# Altium footprint library OK0110_Motorized_Door_Lock_V2.0.PcbLib: 16 footprints
Each footprint in its own frame and in the unit in brackets; x right, y up, seen from the top. Pads: shape width x height; smd on the part's side, far side on the other; paste and mask are expansions set on the pad; w line width, h text height; cw(c..) or ccw(c..) is an arc to the next point about the centre after c.
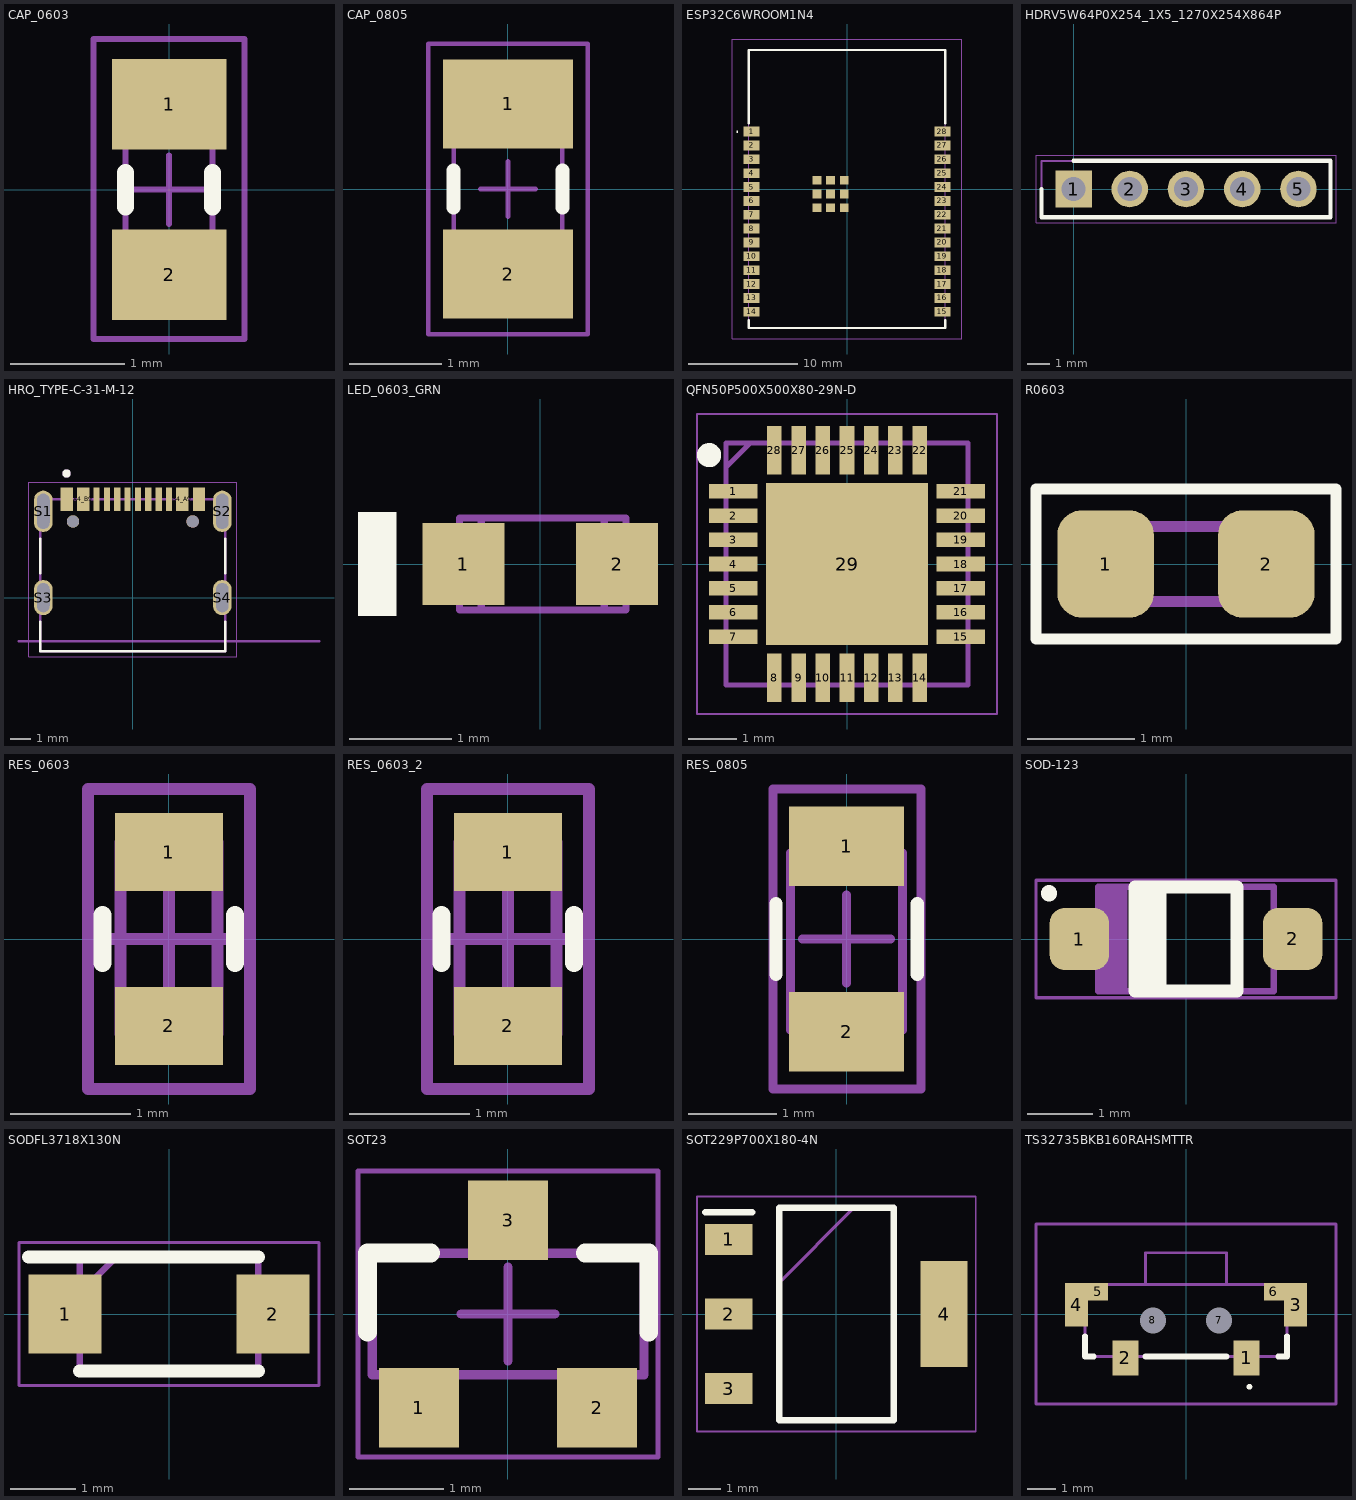
[diagram p0: the footprints below, top view; thin cyan lines are the x and y axes]

## CAP_0603 [mm]
pads (2):
  rect 1x0.79 smd: 1(0,0.745) 2(0,-0.745)
Top Overlay:
  lines w0.15: -0.38,-0.15 -0.38,0.15 ; 0.38,-0.15 0.38,0.15
Mechanical 13:
  lines w0.05: -0.4,-0.8 -0.4,-0.5 -0.38,-0.5 -0.38,0.5 -0.4,0.5 -0.4,0.8 0.4,0.8 0.4,0.5 0.38,0.5 0.38,-0.5 0.4,-0.5 0.4,-0.8 -0.4,-0.8
Mechanical 15:
  lines w0.05: -0.3,0 0.3,0 ; 0,-0.3 0,0.3 ; -0.66,-1.305 -0.66,1.315 0.66,1.315 0.66,-1.305 -0.66,-1.305
3D body: height 0.8, standoff 0, extent -0.4,0.5 0.4,0.8
3D body: height 0.78, standoff 0.02, extent -0.38,-0.5 0.38,0.5
3D body: height 0.8, standoff 0, extent -0.4,-0.8 0.4,-0.5

## CAP_0805 [mm]
pads (2):
  rect 1.4x0.96 smd: 1(0,0.92) 2(0,-0.92)
Top Overlay:
  lines w0.15: -0.59,-0.2 -0.59,0.2 ; 0.59,-0.2 0.59,0.2
Mechanical 13:
  lines w0.05: -0.625,-1 -0.625,-0.5 -0.585,-0.5 -0.585,0.5 -0.625,0.5 -0.625,1 0.625,1 0.625,0.5 0.585,0.5 0.585,-0.5 0.625,-0.5 0.625,-1 -0.625,-1
Mechanical 15:
  lines w0.05: -0.3,0 0.3,0 ; 0,-0.3 0,0.3 ; -0.86,-1.57 0.86,-1.57 0.86,1.57 -0.86,1.57 -0.86,-1.57
3D body: height 1, standoff 0, extent -0.625,0.5 0.625,1
3D body: height 0.94, standoff 0.06, extent -0.585,-0.5 0.585,0.5
3D body: height 1, standoff 0, extent -0.625,-1 0.625,-0.5

## ESP32C6WROOM1N4 [mm]
pads (37):
  rect 1.5x0.9 smd: 1(-8.75,5.26) 2(-8.75,3.99) 3(-8.75,2.72) 4(-8.75,1.45) 5(-8.75,0.18) 6(-8.75,-1.09) 7(-8.75,-2.36) 8(-8.75,-3.63) 9(-8.75,-4.9) 10(-8.75,-6.17) 11(-8.75,-7.44) 12(-8.75,-8.71) 13(-8.75,-9.98) 14(-8.75,-11.25) 15(8.75,-11.25) 16(8.75,-9.98) 17(8.75,-8.71) 18(8.75,-7.44) 19(8.75,-6.17) 20(8.75,-4.9) 21(8.75,-3.63) 22(8.75,-2.36) 23(8.75,-1.09) 24(8.75,0.18) 25(8.75,1.45) 26(8.75,2.72) 27(8.75,3.99) 28(8.75,5.26)
  rect 0.8x0.8 smd: 29(-1.505,-0.46) 30(-1.505,0.79) 31(-2.755,0.79) 32(-2.755,-0.46) 33(-2.755,-1.71) 34(-1.505,-1.71) 35(-0.255,-1.71) 36(-0.255,-0.46) 37(-0.255,0.79)
Top Overlay:
  lines w0.1: -10.1,5.26 cw(c-10.05,5.26) -10,5.26 cw(c-10.05,5.26) -10.1,5.26
  lines w0.2: -9,-12 -9,-12.75 9,-12.75 9,-12 ; -9,6 -9,12.75 9,12.75 9,6
Mechanical 13:
  lines w0.1: -9,-12.75 9,-12.75 9,12.75 -9,12.75 -9,-12.75
Mechanical 15:
  lines w0.1: -10.5,-13.75 10.5,-13.75 10.5,13.75 -10.5,13.75 -10.5,-13.75
3D body "ESP32-C6-WROOM-1-N4.stp": height 3.11, standoff 0, extent -9.01,-12.75 9.01,12.75

## HDRV5W64P0X254_1X5_1270X254X864P [mm]
pads (5):
  rect 1.65x1.65 hole 1.1: 1(0,0)
  round 1.65 hole 1.1: 2(2.54,0) 3(5.08,0) 4(7.62,0) 5(10.16,0)
Top Overlay:
  lines w0.2: -1.445,0 -1.445,-1.27 11.605,-1.27 11.605,1.27 0,1.27
Mechanical 13:
  lines w0.1: -1.445,-1.27 11.605,-1.27 11.605,1.27 -1.445,1.27 -1.445,-1.27
Mechanical 15:
  lines w0.05: -1.695,-1.52 11.855,-1.52 11.855,1.52 -1.695,1.52 -1.695,-1.52
3D body "M20-9990546.stp": height 8.64, standoff -3, extent -1.27,-1.27 11.43,1.27

## HRO_TYPE-C-31-M-12 [mm]
pads (18):
  rect 0.6x1.14 smd mask+0.05: A1_B12(-3.2,4.75) A4_B9(-2.4,4.75) B1_A12(3.2,4.75) B4_A9(2.4,4.75)
  rect 0.3x1.14 smd mask+0.05: A5(-1.25,4.75) A6(-0.25,4.75) A7(0.25,4.75) A8(1.25,4.75) B5(1.75,4.75) B6(0.75,4.75) B7(-0.75,4.75) B8(-1.75,4.75)
  oval 0.9x2 hole 0.6 slot 1.7 at 90 deg: S1(-4.325,4.17) S2(4.325,4.17)
  oval 0.9x1.7 hole 0.6 slot 1.4 at 90 deg: S3(-4.325,0) S4(4.325,0)
  round 0.6 hole 0.6 unplated: ""(-2.89,3.68) ""(2.89,3.68)
Top Overlay:
  circle w0.2: c-3.2,6 r0.1
  lines w0.127: -4.47,-1.17 -4.47,-2.6 4.47,-2.6 4.47,-1.17 ; -4.47,1.17 -4.47,2.85 ; 4.47,1.17 4.47,2.85
Mechanical 13:
  circle w0.2: c-3.2,6 r0.1
  lines w0.127: -5.5,-2.11 9,-2.11 ; -4.47,-2.6 -4.47,4.75 4.47,4.75 4.47,-2.6 -4.47,-2.6
  text "PCB EDGE" at 5.2,-1.9 h0.61
Mechanical 15:
  lines w0.05: -5.025,-2.85 5.025,-2.85 5.025,5.57 -5.025,5.57 -5.025,-2.85
3D body "step_temp.STEP": height 3.31, standoff -0.99, extent -4.47,-2.6 4.47,5.305

## LED_0603_GRN [mm]
pads (2):
  rect 0.8x0.8 smd: 1(-0.75,0) 2(0.75,0)
Top Overlay:
  rectangle: -1.778,-0.508 -1.4,0.508
Mechanical 13:
  lines w0.07: -0.575,-0.45 -0.575,0.45 ; 0.625,-0.45 0.625,0.45 ; -0.787,-0.45 -0.787,0.45 0.838,0.45 0.838,-0.45 -0.787,-0.45
3D body: height 0.36, standoff 0.35, extent -0.574,-0.449 0.625,0.45
3D body: height 0.35, standoff 0, extent -0.787,-0.45 -0.575,0.45
3D body: height 0.35, standoff 0, extent -0.574,-0.449 0.625,0.45
3D body: height 0.8, standoff 0.35, extent -0.574,-0.449 0.625,0.45
3D body: height 0.35, standoff 0, extent 0.626,-0.45 0.838,0.45

## QFN50P500X500X80-29N-D [mm]
pads (29):
  rect 1x0.3 smd: 1(-2.35,1.5) 2(-2.35,1) 3(-2.35,0.5) 4(-2.35,0) 5(-2.35,-0.5) 6(-2.35,-1) 7(-2.35,-1.5) 15(2.35,-1.5) 16(2.35,-1) 17(2.35,-0.5) 18(2.35,0) 19(2.35,0.5) 20(2.35,1) 21(2.35,1.5)
  rect 0.3x1 smd: 8(-1.5,-2.35) 9(-1,-2.35) 10(-0.5,-2.35) 11(0,-2.35) 12(0.5,-2.35) 13(1,-2.35) 14(1.5,-2.35) 22(1.5,2.35) 23(1,2.35) 24(0.5,2.35) 25(0,2.35) 26(-0.5,2.35) 27(-1,2.35) 28(-1.5,2.35)
  rect 3.35x3.35 smd: 29(0,0)
Top Overlay:
  circle w0.25: c-2.85,2.25 r0.125
Mechanical 13:
  lines w0.1: -2.5,2 -2,2.5 ; -2.5,-2.5 2.5,-2.5 2.5,2.5 -2.5,2.5 -2.5,-2.5
Mechanical 15:
  lines w0.05: -3.1,-3.1 3.1,-3.1 3.1,3.1 -3.1,3.1 -3.1,-3.1
3D body "CP2102N-A01-GQFN28.stp": height 0.8, standoff 0, extent -2.55,-2.55 2.55,2.55

## R0603 [mm]
pads (2):
  rrect50% 0.9x1 smd: 1(-0.75,0) 2(0.75,0)
Top Overlay:
  lines w0.1: -1.4,-0.7 1.4,-0.7 1.4,0.7 -1.4,0.7 -1.4,-0.7
Mechanical 13:
  rectangle: -0.8,-0.4 -0.5,0.4
  rectangle: 0.5,-0.4 0.8,0.4
  rectangle: -0.501,-0.399 0.499,-0.299
  rectangle: -0.501,0.301 0.499,0.401
Mechanical 15:
  lines w0.05: -1.4,-0.7 -1.4,0.7 1.4,0.7 1.4,-0.7 -1.4,-0.7
  text ".Designator" at -1.1,-0.1 h0.5
3D body "RES0603.stp": height 0.45, standoff 0, extent -0.8,-0.4 0.8,0.4

## RES_0603 [mm]
pads (2):
  rect 0.9x0.65 smd: 1(0,0.725) 2(0,-0.725)
Top Overlay:
  lines w0.15: -0.553,-0.2 -0.553,0.2 ; 0.553,-0.2 0.553,0.2
Mechanical 13:
  lines w0.1: -0.403,-0.793 0.407,-0.793 0.407,0.807 -0.403,0.807 -0.403,-0.793
Mechanical 15:
  lines w0.1: -0.5,0 0.5,0 ; 0,-0.5 0,0.5 ; -0.673,-1.25 -0.673,1.25 0.677,1.25 0.677,-1.25 -0.673,-1.25
3D body "HGC0603_stp.stp": height 0.5, standoff -0.01, extent -0.403,-0.793 0.387,0.807

## RES_0603_2 [mm]
pads (2):
  rect 0.9x0.65 smd: 1(0,0.725) 2(0,-0.725)
Top Overlay:
  lines w0.15: -0.553,-0.2 -0.553,0.2 ; 0.553,-0.2 0.553,0.2
Mechanical 13:
  lines w0.1: -0.403,-0.793 0.407,-0.793 0.407,0.807 -0.403,0.807 -0.403,-0.793
Mechanical 15:
  lines w0.1: -0.5,0 0.5,0 ; 0,-0.5 0,0.5 ; -0.673,-1.25 -0.673,1.25 0.677,1.25 0.677,-1.25 -0.673,-1.25
3D body "HGC0603_stp.stp": height 0.5, standoff -0.01, extent -0.403,-0.793 0.387,0.807

## RES_0805 [mm]
pads (2):
  rect 1.3x0.9 smd: 1(0,1.05) 2(0,-1.05)
Top Overlay:
  lines w0.15: -0.8,-0.4 -0.8,0.4 ; 0.8,-0.4 0.8,0.4
Mechanical 13:
  lines w0.1: -0.636,-1.033 -0.636,0.977 0.634,0.977 0.634,-1.033 -0.636,-1.033
Mechanical 15:
  lines w0.1: -0.5,0 0.5,0 ; 0,-0.5 0,0.5 ; -0.835,-1.7 0.845,-1.7 0.845,1.7 -0.835,1.7 -0.835,-1.7
3D body "HGC0805_stp.stp": height 0.63, standoff -0.01, extent -0.636,-1.033 0.634,0.977

## SOD-123 [mm]
pads (2):
  rrect50% 0.91x0.95 smd: 1(-1.635,0) 2(1.635,0)
Top Overlay:
  circle w0.25: c-2.1,0.7 r0
  rectangle: -0.78,-0.8 -0.3,0.8
  lines w0.2: -0.78,-0.8 -0.78,0.8 0.78,0.8 0.78,-0.8 -0.78,-0.8
Mechanical 13:
  rectangle: -1.345,-0.8 -0.9,0.8
  lines w0.1: -1.345,-0.8 -1.345,0.8 1.345,0.8 1.345,-0.8 -1.345,-0.8
Mechanical 15:
  lines w0.05: -2.3,-0.9 -2.3,0.9 2.3,0.9 2.3,-0.9 -2.3,-0.9
  text ".Designator" at -2,-0.4 h1.5
3D body "CircuitWorks-SOD123.step": height 1.27, standoff 0, extent -1.85,-0.8 1.85,0.8

## SODFL3718X130N [mm]
pads (2):
  rect 1.12x1.22 smd: 1(-1.6,0) 2(1.6,0)
Top Overlay:
  lines w0.2: -2.16,0.875 1.375,0.875 ; -1.375,-0.875 1.375,-0.875
Mechanical 13:
  lines w0.1: -1.375,0.315 -0.815,0.875 ; -1.375,-0.875 1.375,-0.875 1.375,0.875 -1.375,0.875 -1.375,-0.875
Mechanical 15:
  lines w0.05: -2.31,-1.1 2.31,-1.1 2.31,1.1 -2.31,1.1 -2.31,-1.1
3D body "ATV02W5V0B-HF.stp": height 1.3, standoff 0, extent -1.85,-0.875 1.85,0.875

## SOT23 [mm]
pads (3):
  rect 0.85x0.85 smd: 1(-0.95,-1) 2(0.95,-1) 3(0,1)
Top Overlay:
  lines w0.2: -1.5,-0.195 -1.5,0.65 -0.825,0.65 ; 0.825,0.65 1.5,0.65 1.5,-0.195
Mechanical 13:
  lines w0.1: -1.45,-0.65 1.45,-0.65 1.45,0.65 -1.45,0.65 -1.45,-0.65
Mechanical 15:
  lines w0.05: -1.6,-1.525 1.6,-1.525 1.6,1.525 -1.6,1.525 -1.6,-1.525
  lines w0.1: -0.5,0 0.5,0 ; 0,-0.5 0,0.5
3D body: height 1.17, standoff 0.02, extent -1.45,-0.65 1.45,0.65

## SOT229P700X180-4N [mm]
pads (4):
  rect 1.45x0.95 smd: 1(-3.3,2.29) 2(-3.3,0) 3(-3.3,-2.29)
  rect 1.45x3.25 smd: 4(3.3,0)
Top Overlay:
  lines w0.2: -4.025,3.115 -2.575,3.115 ; -1.752,-3.252 1.752,-3.252 1.752,3.252 -1.752,3.252 -1.752,-3.252
Mechanical 13:
  lines w0.1: -1.752,0.962 0.538,3.252 ; -1.752,-3.252 1.752,-3.252 1.752,3.252 -1.752,3.252 -1.752,-3.252
Mechanical 15:
  lines w0.05: -4.275,-3.605 4.275,-3.605 4.275,3.605 -4.275,3.605 -4.275,-3.605
3D body "AMS1117-3.3.stp": height 1.8, standoff 0, extent -3.355,-3.15 3.355,3.15

## TS32735BKB160RAHSMTTR [mm]
pads (8):
  rect 0.9x1.2 smd: 1(2.1,-1.525) 2(-2.1,-1.525)
  rect 0.8x1.5 smd: 3(3.8,0.325) 4(-3.8,0.325)
  rect 0.7x0.6 smd: 5(-3.05,0.775) 6(3.05,0.775)
  round 0.45 hole 0.9 unplated: 7(1.15,-0.225) 8(-1.15,-0.225)
Top Overlay:
  lines w0.1: 2.2,-2.575 cw(c2.2,-2.525) 2.2,-2.475 cw(c2.2,-2.525) 2.2,-2.575
  lines w0.2: -3.5,-0.775 -3.5,-1.475 -3.2,-1.475 ; -1.4,-1.475 1.4,-1.475 ; 3.2,-1.475 3.5,-1.475 3.5,-0.775
Mechanical 13:
  lines w0.1: -3.5,-1.475 -3.5,1.025 3.5,1.025 3.5,-1.475 -3.5,-1.475 ; -1.4,1.025 1.4,1.025 1.4,2.125 -1.4,2.125 -1.4,1.025
Mechanical 15:
  lines w0.1: -5.2,-3.125 -5.2,3.125 5.2,3.125 5.2,-3.125 -5.2,-3.125
3D body "TS32-7-35-BK-B-260-RA-SMT-TR.stp": height 3.52, standoff -0.75, extent -3.9,-2 3.9,1.87